# Altium footprint library IC.PcbLib: 204 footprints (part 13 of 13)
Each footprint in its own frame and in the unit in brackets; x right, y up, seen from the top. Pads: shape width x height; smd on the part's side, far side on the other; paste and mask are expansions set on the pad; w line width, h text height; cw(c..) or ccw(c..) is an arc to the next point about the centre after c.
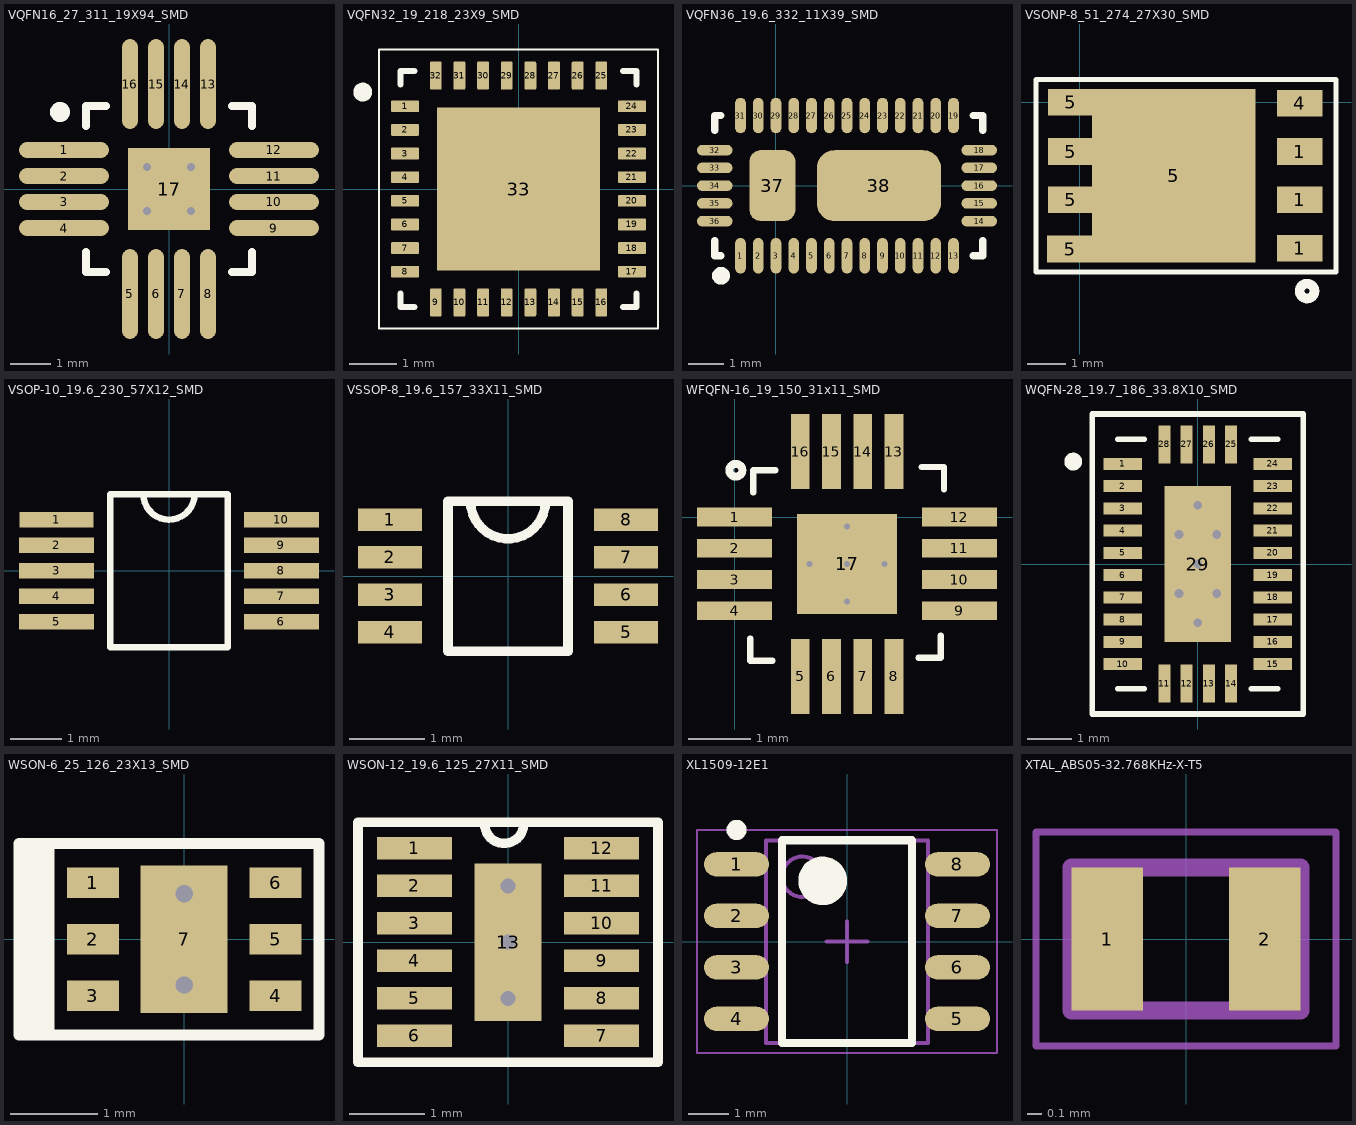
[diagram p12: the footprints below, top view; thin cyan lines are the x and y axes]

## VQFN16_27_311_19X94_SMD [mm] "PQFN, 16-Leads, Body 4.00x4.00mm, Pitch 0.65mm, Thermal Pad 2.05x2.05mm"
height 1
pads (17):
  oval 2.25x0.4 smd mask+0.076: 1(-2.625,0.975) 2(-2.625,0.325) 3(-2.625,-0.325) 4(-2.625,-0.975) 9(2.625,-0.975) 10(2.625,-0.325) 11(2.625,0.325) 12(2.625,0.975)
  oval 0.4x2.25 smd mask+0.076: 5(-0.975,-2.625) 6(-0.325,-2.625) 7(0.325,-2.625) 8(0.975,-2.625) 13(0.975,2.625) 14(0.325,2.625) 15(-0.325,2.625) 16(-0.975,2.625)
  rect 2.05x2.05 smd mask+0.076: 17(0,0)
via 0.55,-0.55 diameter 0.5 hole 0.2
via -0.55,-0.55 diameter 0.5 hole 0.2
via 0.55,0.55 diameter 0.5 hole 0.2
via -0.55,0.55 diameter 0.5 hole 0.2
Top Overlay:
  circle w0.25: c-2.725,1.925 r0.125
  lines w0.2: -2.075,-1.575 -2.075,-2.075 -1.575,-2.075 ; -2.075,1.575 -2.075,2.075 -1.575,2.075 ; 1.575,-2.075 2.075,-2.075 2.075,-1.575 ; 1.575,2.075 2.075,2.075 2.075,1.575
3D body "INA3221.step": height 1, standoff 0, extent -2.075,-2.075 2.075,2.075

## VQFN32_19_218_23X9_SMD [mm]
pads (33):
  rrect25% 0.6x0.25 smd mask+0: 1(-2.4,1.75) 2(-2.4,1.25) 3(-2.4,0.75) 4(-2.4,0.25) 5(-2.4,-0.25) 6(-2.4,-0.75) 7(-2.4,-1.25) 8(-2.4,-1.75) 17(2.4,-1.75) 18(2.4,-1.25) 19(2.4,-0.75) 20(2.4,-0.25) 21(2.4,0.25) 22(2.4,0.75) 23(2.4,1.25) 24(2.4,1.75)
  rrect25% 0.25x0.6 smd mask+0: 9(-1.75,-2.4) 10(-1.25,-2.4) 11(-0.75,-2.4) 12(-0.25,-2.4) 13(0.25,-2.4) 14(0.75,-2.4) 15(1.25,-2.4) 16(1.75,-2.4) 25(1.75,2.4) 26(1.25,2.4) 27(0.75,2.4) 28(0.25,2.4) 29(-0.25,2.4) 30(-0.75,2.4) 31(-1.25,2.4) 32(-1.75,2.4)
  rect 3.45x3.45 smd paste-3 mask+0: 33(0,0)
Top Overlay:
  circle w0.2: c-3.295,2.05 r0.1
  lines w0.05: -2.95,-2.95 2.95,-2.95 2.95,2.95 -2.95,2.95 -2.95,-2.95
  lines w0.127: -2.5,-2.205 -2.5,-2.5 -2.205,-2.5 ; -2.5,2.205 -2.5,2.5 -2.205,2.5 ; 2.205,-2.5 2.5,-2.5 2.5,-2.205 ; 2.205,2.5 2.5,2.5 2.5,2.205
Top Paste:
  region: 1.59,-1.59 0.1,-1.59 0.1,-0.1 1.59,-0.1
  region: -0.1,-1.59 -1.59,-1.59 -1.59,-0.1 -0.1,-0.1
  region: 1.59,0.1 0.1,0.1 0.1,1.59 1.59,1.59
  region: -0.1,0.1 -1.59,0.1 -1.59,1.59 -0.1,1.59
Top Solder:
  drawing of 33 lines, arcs and shapes, not listed
3D body "User Library-VQFN-32.step": height 1.01, standoff 0, extent -2.56,-2.56 2.56,2.56

## VQFN36_19.6_332_11X39_SMD [mm] "QFN, 36-Leads, Body 7.15x3.65mm, Pitch 0.50mm, Thermal Pad 6.30x2.20mm, IPC Medium Density"
height 1
pads (38):
  oval 0.3x1 smd mask+0.076: 1(-1,-1.975) 2(-0.5,-1.975) 3(0,-1.975) 4(0.5,-1.975) 5(1,-1.975) 6(1.5,-1.975) 7(2,-1.975) 8(2.5,-1.975) 9(3,-1.975) 10(3.5,-1.975) 11(4,-1.975) 12(4.5,-1.975) 13(5,-1.975) 19(5,1.975) 20(4.5,1.975) 21(4,1.975) 22(3.5,1.975) 23(3,1.975) 24(2.5,1.975) 25(2,1.975) 26(1.5,1.975) 27(1,1.975) 28(0.5,1.975) 29(0,1.975) 30(-0.5,1.975) 31(-1,1.975)
  oval 1x0.3 smd mask+0.076: 14(5.725,-1) 15(5.725,-0.5) 16(5.725,0) 17(5.725,0.5) 18(5.725,1) 32(-1.725,1) 33(-1.725,0.5) 34(-1.725,0) 35(-1.725,-0.5) 36(-1.725,-1)
  rrect50% 1.3x2 smd: 37(-0.1,0)
  rrect50% 3.5x2 smd: 38(2.9,0)
Top Overlay:
  circle w0.25: c-1.55,-2.54 r0.125
  lines w0.2: -1.725,-1.55 -1.725,-1.975 -1.55,-1.975 ; -1.725,1.55 -1.725,1.975 -1.55,1.975 ; 5.55,-1.975 5.825,-1.975 5.825,-1.55 ; 5.55,1.975 5.825,1.975 5.825,1.55
3D body "VQFN36.step": height 1, standoff 0, extent -1.625,-1.875 5.625,1.875

## VSONP-8_51_274_27X30_SMD [mm] "CASE: VSONP"
height 1.1
pads (9):
  rect 1.2x0.7 smd: 1(5.776,-3.83) 1(5.776,-2.56) 1(5.776,-1.29) 4(5.776,-0.02) 5(-0.249,-3.85) 5(-0.226,-2.56) 5(-0.226,-1.29) 5(-0.226,0)
  rect 4.295x4.55 smd: 5(2.475,-1.925)
Top Overlay:
  circle w0.254: c5.971,-4.953 r0.195
  lines w0.127: -1.143,-4.45 6.731,-4.45 6.731,0.6 -1.143,0.6 -1.143,-4.45
3D body "User Library-VSON-8.step": height 1.01, standoff 0.01, extent -0.226,-4.425 5.776,0.575

## VSOP-10_19.6_230_57X12_SMD [mm] "VSOP Package"
height 1.1
pads (10):
  rect 1.45x0.3 smd mask+0.076: 1(-2.2,1)
  rect 1.47x0.3 smd mask+0.076: 2(-2.2,0.5) 3(-2.2,0) 4(-2.2,-0.5) 5(-2.2,-1) 6(2.2,-1) 7(2.2,-0.5) 8(2.2,0) 9(2.2,0.5) 10(2.2,1)
Top Overlay:
  lines w0.127: -0.5,1.5 ccw(c0,1.5) 0.5,1.499 ; -1.15,-1.5 1.15,-1.5 1.15,1.5 -1.15,1.5 -1.15,-1.5
3D body "ADS1115IDGSR--3DModel-STEP-56544.STEP": height 1.07, standoff -0.03, extent -2.45,-1.5 2.45,1.5

## VSSOP-8_19.6_157_33X11_SMD [mm] "VSSOP"
height 0.9
pads (8):
  rect 0.85x0.3 smd mask+0.076: 1(-1.575,0.75) 2(-1.575,0.25) 3(-1.575,-0.25) 4(-1.575,-0.75) 5(1.575,-0.75) 6(1.575,-0.25) 7(1.575,0.25) 8(1.575,0.75)
Top Overlay:
  lines w0.127: -0.5,1 ccw(c0,1) 0.5,1 ; -0.8,-1 -0.8,1 0.8,1 0.8,-1 -0.8,-1
3D body "74AUP2G86DC,125.stp": height 1, standoff 0, extent -1.55,-1 1.55,1

## WFQFN-16_19_150_31x11_SMD [mm] "WFQFN"
height 0.8
pads (17):
  rect 1.2x0.3 smd mask+0.076: 1(0,0) 2(0,-0.5) 3(0,-1) 4(0,-1.5) 9(3.6,-1.5) 10(3.6,-1) 11(3.6,-0.5) 12(3.6,0)
  rect 0.3x1.2 smd mask+0.076: 5(1.05,-2.55) 6(1.55,-2.55) 7(2.05,-2.55) 8(2.55,-2.55) 13(2.55,1.05) 14(2.05,1.05) 15(1.55,1.05) 16(1.05,1.05)
  rect 1.6x1.6 smd mask+0.076: 17(1.8,-0.75)
via 1.8,-0.75 diameter 0.2 hole 0.1
via 1.8,-1.35 diameter 0.2 hole 0.1
via 1.8,-0.15 diameter 0.2 hole 0.1
via 1.2,-0.75 diameter 0.2 hole 0.1
via 2.4,-0.75 diameter 0.2 hole 0.1
Top Overlay:
  circle w0.127: c0.022,0.75 r0.103
  lines w0.1: 0.25,-1.943 0.25,-2.3 0.607,-2.3 ; 0.3,0.393 0.3,0.75 0.657,0.75 ; 2.943,-2.25 3.3,-2.25 3.3,-1.893 ; 2.993,0.8 3.35,0.8 3.35,0.443
3D body "FSA2567MPX.stp": height 0.8, standoff 0, extent 0.25,-2.3 3.35,0.8

## WQFN-28_19.7_186_33.8X10_SMD [mm] "WQFN Package"
height 0.8
pads (29):
  rect 0.86x0.27 smd: 1(-1.685,2.25) 2(-1.685,1.75) 3(-1.685,1.25) 4(-1.685,0.75) 5(-1.685,0.25) 6(-1.685,-0.25) 7(-1.685,-0.75) 8(-1.685,-1.25) 9(-1.685,-1.75) 10(-1.685,-2.25) 15(1.685,-2.25) 16(1.685,-1.75) 17(1.685,-1.25) 18(1.685,-0.75) 19(1.685,-0.25) 20(1.685,0.25) 21(1.685,0.75) 22(1.685,1.25) 23(1.685,1.75) 24(1.685,2.25)
  rect 0.27x0.86 smd: 11(-0.75,-2.685) 12(-0.25,-2.685) 13(0.25,-2.685) 14(0.75,-2.685) 25(0.75,2.685) 26(0.25,2.685) 27(-0.25,2.685) 28(-0.75,2.685)
  rect 1.5x3.5 smd: 29(0,0)
via 0,1.32 diameter 0.4 hole 0.2
via 0,-1.32 diameter 0.4 hole 0.2
via 0,0 diameter 0.4 hole 0.2
via -0.425,0.66 diameter 0.4 hole 0.2
via -0.425,-0.66 diameter 0.4 hole 0.2
via 0.425,-0.66 diameter 0.4 hole 0.2
via 0.425,0.66 diameter 0.4 hole 0.2
Top Overlay:
  circle w0.2: c-2.8,2.3 r0.1
  lines w0.125: -2.37,-3.37 2.37,-3.37 2.37,3.37 -2.37,3.37 -2.37,-3.37
  lines w0.127: -1.8,-2.8 -1.2,-2.8 ; -1.8,2.8 -1.2,2.8 ; 1.2,-2.8 1.8,-2.8 ; 1.2,2.8 1.8,2.8
Top Paste:
  region: 0.16,1.69 0.69,1.69 0.69,0.16 0.16,0.16
  region: 0.16,-0.16 0.69,-0.16 0.69,-1.69 0.16,-1.69
  region: -0.69,1.69 -0.16,1.69 -0.16,0.16 -0.69,0.16
  region: -0.69,-0.16 -0.16,-0.16 -0.16,-1.69 -0.69,-1.69

## WSON-6_25_126_23X13_SMD [mm] "diode"
height 0.8
pads (7):
  rect 0.6x0.35 smd mask+0.076: 1(-1.05,0.65) 2(-1.05,0) 3(-1.05,-0.65) 4(1.05,-0.65) 5(1.05,0) 6(1.05,0.65)
  rect 1x1.7 smd mask+0.076: 7(0,0)
via 0,0.525 diameter 0.4 hole 0.2
via 0,-0.525 diameter 0.4 hole 0.2
Top Overlay:
  rectangle: -1.85,-1.118 -1.494,1.125
  lines w0.127: -1.1,1.1 1.55,1.1 1.55,-1.1 -1.9,-1.1 -1.9,1.1 -0.9,1.1
3D body "TVS3300DRVR.stp": height 0.8, standoff 0, extent -1.05,-1 1.05,1

## WSON-12_19.6_125_27X11_SMD [mm] "CASE: WSON"
height 0.8
pads (13):
  rect 1x0.3 smd mask+0.076: 1(-1.25,1.25) 2(-1.25,0.75) 3(-1.25,0.25) 4(-1.25,-0.25) 5(-1.25,-0.75) 6(-1.25,-1.25) 7(1.25,-1.25) 8(1.25,-0.75) 9(1.25,-0.25) 10(1.25,0.25) 11(1.25,0.75) 12(1.25,1.25)
  rect 0.889x2.1 smd mask+0.076: 13(0,0)
via 0,0.75 diameter 0.4 hole 0.2
via 0,-0.75 diameter 0.4 hole 0.2
via 0,0 diameter 0.4 hole 0.2
Top Overlay:
  lines w0.127: -0.307,1.535 ccw(c-0.051,1.575) 0.204,1.528 ; -2,-1.6 -2,1.6 2,1.6 2,-1.6 -2,-1.6
3D body "DRV8835DSSR.stp": height 0.8, standoff 0, extent -1.05,-1.5 1.05,1.5

## XL1509-12E1 [mm]
height 1.75
pads (8):
  oval 1.6x0.6 smd: 1(-2.725,1.905) 2(-2.725,0.635) 3(-2.725,-0.635) 4(-2.725,-1.905) 5(2.725,-1.905) 6(2.725,-0.635) 7(2.725,0.635) 8(2.725,1.905)
Top Overlay:
  circle w0.6: c-0.6,1.5 r0.3
  circle w0.25: c-2.725,2.755 r0.125
  lines w0.2: -1.6,-2.5 1.6,-2.5 1.6,2.5 -1.6,2.5 -1.6,-2.5
Mechanical 13:
  circle w0.1: c-1.1,1.6 r0.5
  lines w0.1: -2,-2.5 2,-2.5 2,2.5 -2,2.5 -2,-2.5
Mechanical 15:
  lines w0.05: -3.7,-2.75 3.7,-2.75 3.7,2.75 -3.7,2.75 -3.7,-2.75
  lines w0.1: -0.5,0 0.5,0 ; 0,-0.5 0,0.5
3D body: height 1.75, standoff 0.1, extent -2,-2.5 2,2.5

## XTAL_ABS05-32.768KHz-X-T5 [mm]
height 0.5
pads (2):
  rect 0.5x1 smd: 1(-0.55,0) 2(0.55,0)
Mechanical 13:
  lines w0.127: -0.8,-0.5 0.8,-0.5 0.8,0.5 -0.8,0.5 -0.8,-0.5
Mechanical 15:
  lines w0.05: -1.05,-0.75 1.05,-0.75 1.05,0.75 -1.05,0.75 -1.05,-0.75
3D body "step_temp.STEP": height 0.5, standoff 0, extent -0.8,-0.5 0.8,0.5